# Altium footprint library SMBJ6P0CA-TR.PcbLib: 3 footprints
Each footprint in its own frame and in the unit in brackets; x right, y up, seen from the top. Pads: shape width x height; smd on the part's side, far side on the other; paste and mask are expansions set on the pad; w line width, h text height; cw(c..) or ccw(c..) is an arc to the next point about the centre after c.
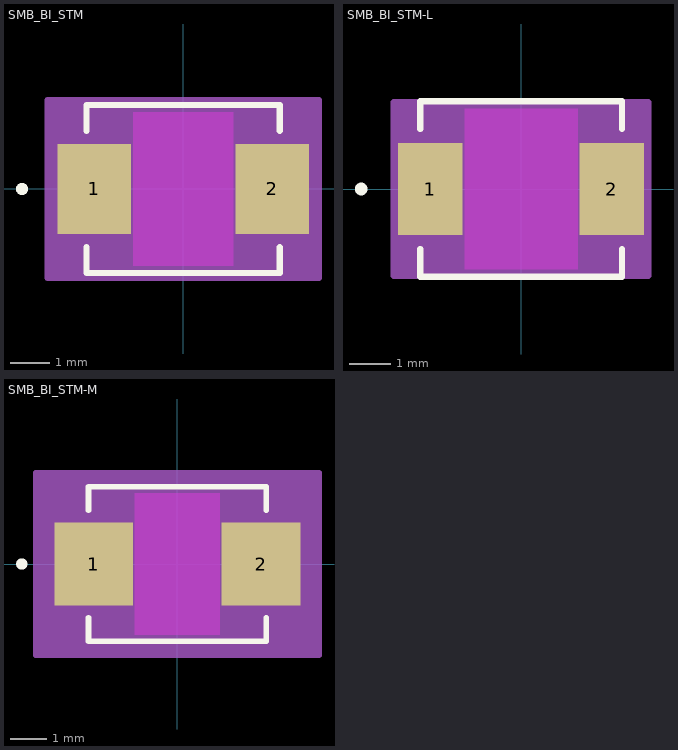
[diagram p0: the footprints below, top view; thin cyan lines are the x and y axes]

## SMB_BI_STM [mm]
pads (2):
  rect 1.849x2.26 smd paste+0 mask+0: 1(-2.232,0) 2(2.232,0)
Top Layer keep-out:
  region: -1.257,-1.93 -1.257,1.93 1.257,1.93 1.257,-1.93
Top Overlay:
  circle w0.152: c-4.046,0 r0.076
  lines w0.152: -2.426,-1.463 -2.426,-2.108 2.426,-2.108 2.426,-1.463 ; -2.426,1.463 -2.426,2.108 2.426,2.108 2.426,1.463
  text ".Designator" at -3.492,-0.635 h1.27
Keep-Out Layer:
  region: -1.257,-1.93 -1.257,1.93 1.257,1.93 1.257,-1.93
Mechanical 13:
  circle w0.025: c-2.232,0 r0.076
  lines w0.025: -2.299,-0.991 -1.308,-1.981 ; -2.299,0.991 -1.308,1.981 ; -2.807,-1.105 -2.807,1.105 -2.299,1.105 -2.299,-1.105 -2.807,-1.105 ; -2.299,-1.981 2.299,-1.981 2.299,1.981 -2.299,1.981 -2.299,-1.981 ; 2.299,-1.105 2.299,1.105 2.807,1.105 2.807,-1.105 2.299,-1.105
  text ".Designator" at -3.492,-0.635 h1.27
Mechanical 15:
  region: 3.411,-2.235 -3.411,-2.235 -3.411,2.235 3.411,2.235
  lines w0.152: -3.411,-2.235 -3.411,2.235 3.411,2.235 3.411,-2.235 -3.411,-2.235

## SMB_BI_STM-L [mm]
pads (2):
  rect 1.549x2.22 smd paste+0 mask+0: 1(-2.182,0) 2(2.182,0)
Top Layer keep-out:
  region: -1.357,-1.93 -1.357,1.93 1.357,1.93 1.357,-1.93
Top Overlay:
  circle w0.152: c-3.846,0 r0.076
  lines w0.152: -2.426,-1.443 -2.426,-2.108 2.426,-2.108 2.426,-1.443 ; -2.426,1.443 -2.426,2.108 2.426,2.108 2.426,1.443
  text ".Designator" at -3.492,-0.635 h1.27
Keep-Out Layer:
  region: -1.357,-1.93 -1.357,1.93 1.357,1.93 1.357,-1.93
Mechanical 13:
  circle w0.025: c-2.182,0 r0.076
  lines w0.025: -2.299,-0.991 -1.308,-1.981 ; -2.299,0.991 -1.308,1.981 ; -2.807,-1.105 -2.807,1.105 -2.299,1.105 -2.299,-1.105 -2.807,-1.105 ; -2.299,-1.981 2.299,-1.981 2.299,1.981 -2.299,1.981 -2.299,-1.981 ; 2.299,-1.105 2.299,1.105 2.807,1.105 2.807,-1.105 2.299,-1.105
  text ".Designator" at -3.492,-0.635 h1.27
Mechanical 15:
  region: 3.058,-2.083 -3.058,-2.083 -3.058,2.083 3.058,2.083
  lines w0.152: -3.058,-2.083 -3.058,2.083 3.058,2.083 3.058,-2.083 -3.058,-2.083

## SMB_BI_STM-M [mm]
pads (2):
  rect 2.149x2.26 smd paste+0 mask+0: 1(-2.282,0) 2(2.282,0)
Top Layer keep-out:
  region: -1.157,-1.93 -1.157,1.93 1.157,1.93 1.157,-1.93
Top Overlay:
  circle w0.152: c-4.246,0 r0.076
  lines w0.152: -2.426,-1.463 -2.426,-2.108 2.426,-2.108 2.426,-1.463 ; -2.426,1.463 -2.426,2.108 2.426,2.108 2.426,1.463
  text ".Designator" at -3.492,-0.635 h1.27
Keep-Out Layer:
  region: -1.157,-1.93 -1.157,1.93 1.157,1.93 1.157,-1.93
Mechanical 13:
  circle w0.025: c-2.282,0 r0.076
  lines w0.025: -2.299,-0.991 -1.308,-1.981 ; -2.299,0.991 -1.308,1.981 ; -2.807,-1.105 -2.807,1.105 -2.299,1.105 -2.299,-1.105 -2.807,-1.105 ; -2.299,-1.981 2.299,-1.981 2.299,1.981 -2.299,1.981 -2.299,-1.981 ; 2.299,-1.105 2.299,1.105 2.807,1.105 2.807,-1.105 2.299,-1.105
  text ".Designator" at -3.492,-0.635 h1.27
Mechanical 15:
  region: 3.865,-2.489 -3.865,-2.489 -3.865,2.489 3.865,2.489
  lines w0.152: -3.865,-2.489 -3.865,2.489 3.865,2.489 3.865,-2.489 -3.865,-2.489